# Altium integrated library PCB_Project1.IntLib: 51 symbols (part 1 of 2)
Pins are listed as number, name and electrical type; pins without a type are passive.

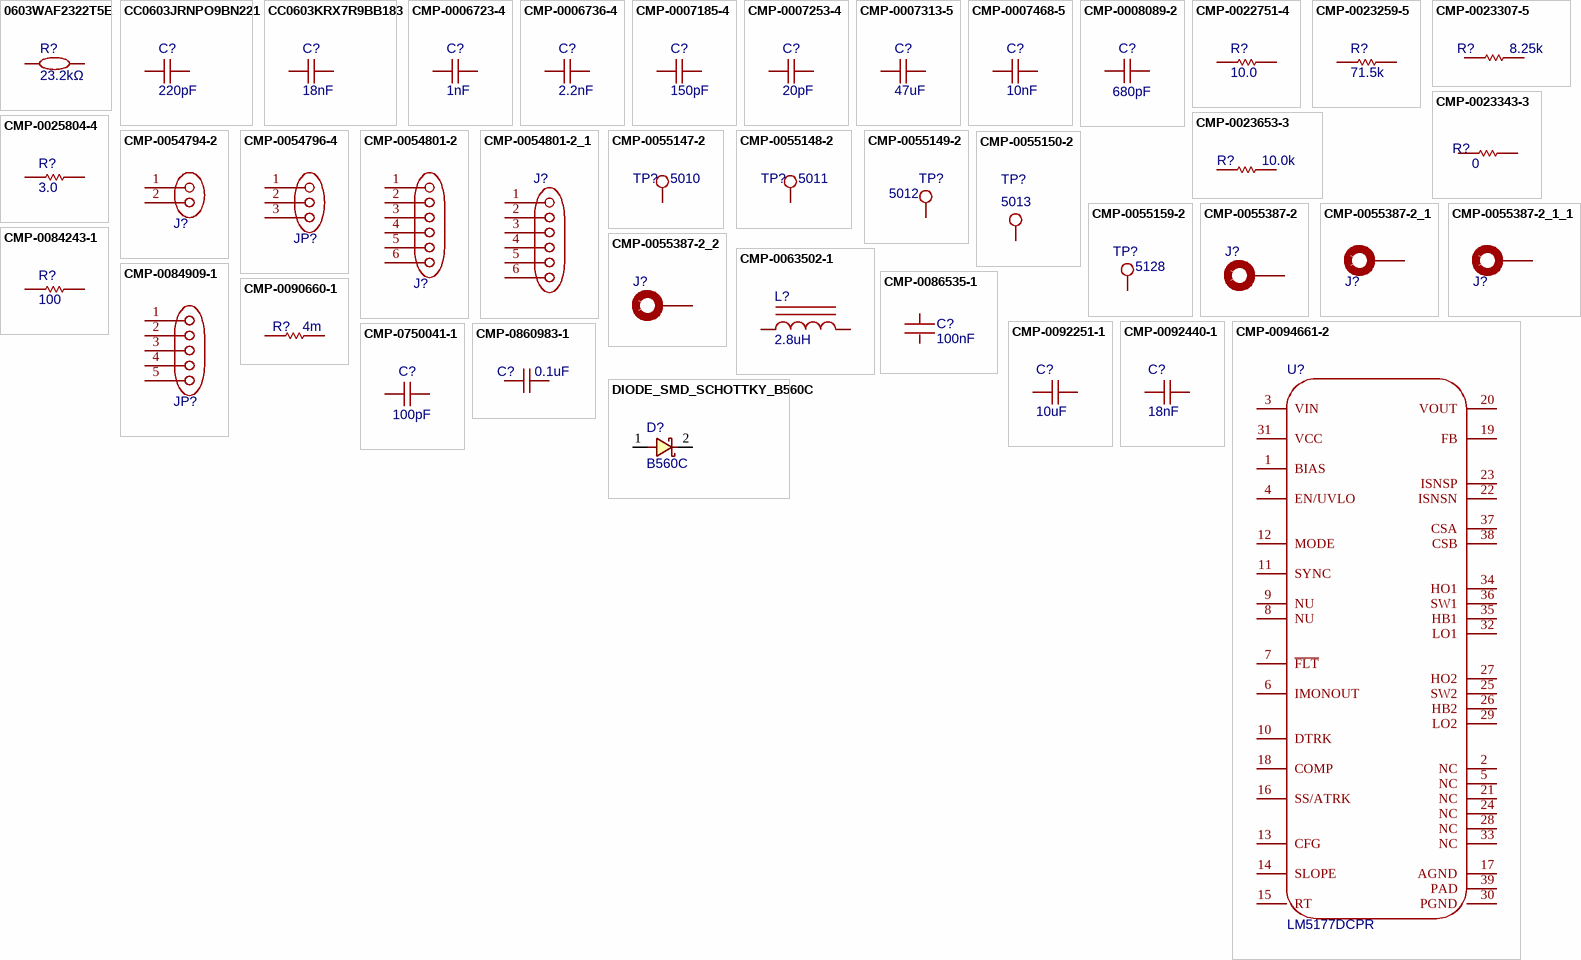
[diagram p0: symbols 0603WAF2322T5E to DIODE_SMD_SCHOTTKY_B560C]

## 0603WAF2322T5E
designator R?, comment 23.2kΩ
电阻类型:厚膜电阻;阻值:23.2kΩ;精度:±1%;功率:100mW;工作电压:75V;温度系数:±100ppm/℃;; Manufacturer: UNI-ROYAL(厚声); Symbol: 0603WAF2322T5E; Add into BOM: yes; 3D Model: fc143cca1e79419f9cd78b61e9279f08; 3D Model Transform: 31.8897,63.7794,0,90,0,0,0,0,0; Tolerance: ±1%; Power(Watts): 100mW; Voltage-Supply(Max): 75V; ModelName: R0603; Device: 0603WAF2322T5E; Convert to PCB: yes; LCSC Part Name: 23.2kΩ ±1% 100mW 厚膜电阻; Supplier Part: C23346; Manufacturer Part: 0603WAF2322T5E; Supplier Footprint: 0603; JLCPCB Part Class: Extended Part; Datasheet: https://item.szlcsc.com/datasheet/0603WAF2322T5E/24079.html; Supplier: LCSC; Type: 厚膜电阻; Temperature Coefficient: ±100ppm/℃; Operating Temperature: -55℃~+155℃; FootprintName: R0603; Value: 23.2kΩ
3D model R0603
footprint R0603D (CHIP Resistor 1/10 WATT, 1.6x0.8mm, 0603, SMD (SolderMask Defined))
pins: 1, 2

## CC0603JRNPO9BN221
designator C?, comment 220pF
容值:220pF;精度:±5%;额定电压:50V;温度系数:NP0;; Manufacturer: YAGEO(国巨); Symbol: CC0603JRNPO9BN221; Add into BOM: yes; 3D Model: ac125912035d415993ca9572d50418b1; 3D Model Transform: 62.992,31.496,0,0,0,0,0,0,0; Tolerance: ±5%; Voltage Rating: 50V; Temperature Coefficient: NP0; ModelName: C0603_L1.6-W0.8-H0.8; Device: CC0603JRNPO9BN221; Convert to PCB: yes; Value: 220pF; LCSC Part Name: 220pF ±5% 50V; Supplier Part: C106210; Manufacturer Part: CC0603JRNPO9BN221; Supplier Footprint: 0603; JLCPCB Part Class: Extended Part; Datasheet: https://item.szlcsc.com/datasheet/CC0603JRNPO9BN221/107425.html; Supplier: LCSC; FootprintName: C0603
footprint C0603D (CHIP Capacitor, 1.6X0.8mm, 0603 , SMD (SolderMask Defined))
3D model C0603_L1.6-W0.8-H0.8
pins: 1, 2

## CC0603KRX7R9BB183
designator C?, comment 18nF
容值:18nF;精度:±10%;额定电压:50V;温度系数:X7R;; Manufacturer: YAGEO(国巨); Symbol: CC0603KRX7R9BB183; Add into BOM: yes; 3D Model: ac125912035d415993ca9572d50418b1; 3D Model Transform: 62.992,31.496,0,0,0,0,0,0,0; Tolerance: ±10%; Voltage Rating: 50V; Temperature Coefficient: X7R; ModelName: C0603_L1.6-W0.8-H0.8; Device: CC0603KRX7R9BB183; Convert to PCB: yes; Value: 18nF; LCSC Part Name: 18nF ±10% 50V; Supplier Part: C107079; Manufacturer Part: CC0603KRX7R9BB183; Supplier Footprint: 0603; JLCPCB Part Class: Extended Part; Datasheet: https://item.szlcsc.com/datasheet/CC0603KRX7R9BB183/108295.html; Supplier: LCSC; FootprintName: C0603
footprint C0603D (CHIP Capacitor, 1.6X0.8mm, 0603 , SMD (SolderMask Defined))
3D model C0603_L1.6-W0.8-H0.8
pins: 1, 2

## CMP-0006723-4
designator C?, comment Cap_F: 1nF  (hidden comment: 06031C102JAT2A)
CAP, CERM, 1000 pF, 100 V, +/- 5%, X7R, 0603; Manufacturer: AVX; Device: CMP-0006723-4; TaMin_C: -55癈; ESR_ohm: 2.76d; Polarized: N; SizeAreaWB_mm2: 4.68; Value1: 0.276 ohm; U/M: EA; Value: 1000pF; TaMax_C: 125癈; SizeZ_mm: 1; SizeX_mm: 1.6; SizeY_mm: 0.8; Cap_Case: 0603; Value2: 100V; SizeArea_mm2: 1.28; CompType: Capacitor; AEC Category: Q200; OriginFootprint 2: 0603_HV; OriginFootprint 3: 0603L; OriginFootprint 4: 0603M; UniqueId: 553def7d7947fca6; AddInBom: yes; Symbol: CMP-0006723-4; Supplier Part Number 2: 96M1234; Publisher: Texas Instruments; Supplier 2: Newark; Supplier Part Number 3: 581-06031C102J; TempCo: X7R; Supplier 3: Mouser; Published: 2008-06-19; RoHS: Y; MountType: SMT; Supplier 1: Digi-Key; PackageReference: 0603; Tolerance_%: 5%; LatestRevisionDate: 2017-03-09; PartNumber: 06031C102JAT2A; AEC Qualified: N; VDC_V: 100V; ComponentLink1Description: Datasheet link; AEC Grade: N/A; Supplier Part Number 1: 478-3698-1-ND; Technology: Ceramic; ValueDisplayed: 1000pF; ComponentLink1URL: http://datasheets.avx.com/X7RDielectric.pdf; Origin Footprint: 0603; DesignItemID: CMP-0006723-4; LibraryName: Altium Vault - TI; FootprintName: 0603S
footprint C0603D (CHIP Capacitor, 1.6X0.8mm, 0603 , SMD (SolderMask Defined))
pins: 1, 2

## CMP-0006736-4
designator C?, comment Cap_F: 2.2nF  (hidden comment: 06031C222JAT2A)
CAP, CERM, 2200 pF, 100 V, +/- 5%, X7R, 0603; Manufacturer: AVX; Device: CMP-0006736-4; TaMin_C: -55癈; ESR_ohm: 0.192; Polarized: N; SizeAreaWB_mm2: 4.68; Value1: 0.192 ohm; U/M: EA; Value: 2200pF; TaMax_C: 125癈; SizeZ_mm: 1; SizeX_mm: 1.6; SizeY_mm: 0.8; Cap_Case: 0603; Value2: 100V; SizeArea_mm2: 1.28; CompType: Capacitor; AEC Category: Q200; OriginFootprint 2: 0603_HV; OriginFootprint 3: 0603L; OriginFootprint 4: 0603M; UniqueId: deb55bbe20a101cf; AddInBom: yes; Symbol: CMP-0006736-4; Supplier Part Number 2: 96M1245; Publisher: Texas Instruments; Supplier 2: Newark; Supplier Part Number 3: 581-06031C222J; TempCo: X7R; Supplier 3: Mouser; Published: 2008-06-19; RoHS: Y; MountType: SMT; Supplier 1: Digi-Key; PackageReference: 0603; Tolerance_%: 5%; LatestRevisionDate: 2017-03-09; PartNumber: 06031C222JAT2A; AEC Qualified: N; VDC_V: 100V; ComponentLink1Description: Datasheet link; AEC Grade: N/A; Supplier Part Number 1: 478-3705-1-ND; Technology: Ceramic; ValueDisplayed: 2200pF; ComponentLink1URL: http://datasheets.avx.com/X7RDielectric.pdf; Origin Footprint: 0603; DesignItemID: CMP-0006736-4; LibraryName: Altium Vault - TI; FootprintName: 0603S
footprint C0603D (CHIP Capacitor, 1.6X0.8mm, 0603 , SMD (SolderMask Defined))
pins: 1, 2

## CMP-0007185-4
designator C?, comment ValueDisplayed: 150pF  (hidden comment: GRM1885C1H151JA01D)
CAP, CERM, 150 pF, 50 V, +/- 5%, C0G/NP0, 0603; Manufacturer: MuRata; Device: CMP-0007185-4; TaMin_C: -55癈; Polarized: N; SizeAreaWB_mm2: 4.68; Value1: Unknown; U/M: EA; Value: 150pF; TaMax_C: 125癈; SizeZ_mm: 1; SizeX_mm: 1.6; SizeY_mm: 0.8; Cap_Case: 0603; Value2: 50V; SizeArea_mm2: 1.28; CompType: Capacitor; AEC Category: Q200; OriginFootprint 2: 0603_HV; OriginFootprint 3: 0603L; OriginFootprint 4: 0603M; UniqueId: ff078052695da6b6; AddInBom: yes; Symbol: CMP-0007185-4; Supplier Part Number 2: 81-GRM39C151J50; Publisher: Texas Instruments; Supplier 2: Mouser; Supplier Part Number 3: 8819874; TempCo: C0G/NP0; Supplier 3: Farnell; Published: 2008-06-19; RoHS: Y; MountType: SMT; Supplier 1: Digi-Key; PackageReference: 0603; Tolerance_%: 5%; LatestRevisionDate: 2017-03-09; PartNumber: GRM1885C1H151JA01D; AEC Qualified: ?; Cap_F: 150pF; VDC_V: 50V; ComponentLink1Description: Datasheet link; Supplier Part Number 1: 490-1431-1-ND; Technology: Ceramic; ComponentLink1URL: http://search.murata.co.jp/Ceramy/PnsearchViewAction.do?HnOFG=ON&HnNFG=ON&SEL_CNT=50&sLang=en&sKey=GRM1885C1H151JA01D&x=9&y=9&search=startwith; Origin Footprint: 0603; DesignItemID: CMP-0007185-4; LibraryName: Altium Vault - TI; FootprintName: 0603S
footprint C0603D (CHIP Capacitor, 1.6X0.8mm, 0603 , SMD (SolderMask Defined))
pins: 1, 2

## CMP-0007253-4
designator C?, comment ValueDisplayed: 20pF  (hidden comment: GRM1885C2A200JA01D)
CAP, CERM, 20 pF, 100 V, +/- 5%, C0G/NP0, 0603; Manufacturer: MuRata; Device: CMP-0007253-4; TaMin_C: -55癈; Polarized: N; SizeAreaWB_mm2: 4.68; Value1: Unknown; U/M: EA; Value: 20pF; TaMax_C: 125癈; SizeZ_mm: 1; SizeX_mm: 1.6; SizeY_mm: 0.8; Cap_Case: 0603; Value2: 100V; SizeArea_mm2: 1.28; CompType: Capacitor; AEC Category: Q200; OriginFootprint 2: 0603_HV; OriginFootprint 3: 0603L; OriginFootprint 4: 0603M; UniqueId: c8e923f96b539988; AddInBom: yes; Symbol: CMP-0007253-4; Supplier Part Number 2: 81-GRM1885C2A200JA1D; Publisher: Texas Instruments; Supplier 2: Mouser; TempCo: C0G/NP0; Published: 2008-06-19; RoHS: Y; MountType: SMT; Supplier 1: Digi-Key; PackageReference: 0603; Tolerance_%: 5%; LatestRevisionDate: 2017-03-09; PartNumber: GRM1885C2A200JA01D; AEC Qualified: ?; Cap_F: 20pF; VDC_V: 100V; ComponentLink1Description: Datasheet link; Supplier Part Number 1: 490-1334-1-ND; Technology: Ceramic; ComponentLink1URL: http://search.murata.co.jp/Ceramy/PnsearchViewAction.do?HnOFG=ON&HnNFG=ON&SEL_CNT=50&sLang=en&sKey=GRM1885C2A200JA01D&x=9&y=9&search=startwith; Origin Footprint: 0603; DesignItemID: CMP-0007253-4; LibraryName: Altium Vault - TI; FootprintName: 0603S
footprint C0603S (CHIP Capacitor, 1.6X0.8mm, 0603, soldered)
pins: 1, 2

## CMP-0007313-5
designator C?, comment ValueDisplayed: 47uF  (hidden comment: GRM188R60J476ME15D)
CAP, CERM, 47 uF, 6.3 V, +/- 20%, X5R, 0603; Manufacturer: MuRata; Device: CMP-0007313-5; TaMin_C: -55癈; Polarized: N; SizeAreaWB_mm2: 4.68; Value1: Unknown; U/M: EA; Value: 47uF; TaMax_C: 85癈; SizeZ_mm: 1; SizeX_mm: 1.6; SizeY_mm: 0.8; Cap_Case: 0603; Value2: 6.3V; SizeArea_mm2: 1.28; CompType: Capacitor; Cap_F: 47礔; AEC Category: Q200; OriginFootprint 2: 0603_HV; OriginFootprint 3: 0603L; OriginFootprint 4: 0603M; UniqueId: 48700c84863a802e; AddInBom: yes; Symbol: CMP-0007313-5; Publisher: Texas Instruments; TempCo: X5R; Published: 2008-06-19; RoHS: Y; MountType: SMT; PackageReference: 0603; Tolerance_%: 20%; LatestRevisionDate: 2017-03-09; PartNumber: GRM188R60J476ME15D; AEC Qualified: ?; VDC_V: 6.3V; ComponentLink1Description: Datasheet link; Technology: Ceramic; ComponentLink1URL: http://psearch.en.murata.com/capacitor/product/GRM188R60J476ME15%23.pdf; Origin Footprint: 0603; DesignItemID: CMP-0007313-5; LibraryName: Altium Vault - TI; FootprintName: 0603S
footprint C0603S (CHIP Capacitor, 1.6X0.8mm, 0603, soldered)
pins: 1, 2

## CMP-0007468-5
designator C?, comment Cap_F: 10nF  (hidden comment: GRM188R72A103KA01D)
CAP, CERM, 0.01 uF, 100 V, +/- 10%, X7R, 0603; Manufacturer: MuRata; Device: CMP-0007468-5; TaMin_C: -55癈; Polarized: N; SizeAreaWB_mm2: 4.68; Value1: Unknown; U/M: EA; Value: 0.01uF; TaMax_C: 125癈; SizeZ_mm: 1; SizeX_mm: 1.6; SizeY_mm: 0.8; Cap_Case: 0603; Value2: 100V; SizeArea_mm2: 1.28; CompType: Capacitor; AEC Category: Q200; OriginFootprint 2: 0603_HV; OriginFootprint 3: 0603L; OriginFootprint 4: 0603M; UniqueId: 6827ca7a6bd67e26; AddInBom: yes; Symbol: CMP-0007468-5; Supplier Part Number 2: 81-GRM188R72A103KA1D; Publisher: Texas Instruments; Supplier 2: Mouser; TempCo: X7R; Published: 2008-06-19; RoHS: Y; MountType: SMT; Supplier 1: Digi-Key; PackageReference: 0603; Tolerance_%: 10%; LatestRevisionDate: 2017-03-09; PartNumber: GRM188R72A103KA01D; AEC Qualified: ?; VDC_V: 100V; ComponentLink1Description: Datasheet link; Supplier Part Number 1: GRM188R72A103KA01D-ND; Technology: Ceramic; ValueDisplayed: 0.01uF; ComponentLink1URL: http://search.murata.co.jp/Ceramy/PnsearchViewAction.do?HnOFG=ON&HnNFG=ON&SEL_CNT=50&sLang=en&sKey=GRM188R72A103KA01D&x=9&y=9&search=startwith; Origin Footprint: 0603; DesignItemID: CMP-0007468-5; LibraryName: Altium Vault - TI; FootprintName: 0603S
footprint C0603D (CHIP Capacitor, 1.6X0.8mm, 0603 , SMD (SolderMask Defined))
pins: 1, 2

## CMP-0008089-2
designator C?, comment ValueDisplayed: 680pF  (hidden comment: GRM2165C1H681JA01D)
CAP, CERM, 680 pF, 50 V, +/- 5%, C0G/NP0, 0805; Manufacturer: MuRata; Device: CMP-0008089-2; TaMin_C: -55癈; Polarized: N; SizeAreaWB_mm2: 6.75; Value1: Unknown; U/M: EA; Value: 680pF; TaMax_C: 125癈; SizeZ_mm: 1.45; SizeX_mm: 2; SizeY_mm: 1.25; Cap_Case: 0805; Value2: 50V; SizeArea_mm2: 2.5; CompType: Capacitor; AEC Category: Q200; Origin Footprint: 0805_HV; OriginFootprint 2: 0805M; OriginFootprint 4: 0805L; UniqueId: 7f35450ac3171d20; AddInBom: yes; Symbol: CMP-0008089-2; Supplier Part Number 2: 81-GRM40C681J50D; Publisher: Texas Instruments; Supplier 2: Mouser; TempCo: C0G/NP0; Published: 2008-06-19; RoHS: Y; MountType: SMT; Supplier 1: Digi-Key; PackageReference: 0805; Tolerance_%: 5%; LatestRevisionDate: 2017-03-09; PartNumber: GRM2165C1H681JA01D; AEC Qualified: ?; Cap_F: 680pF; VDC_V: 50V; ComponentLink1Description: Datasheet link; Supplier Part Number 1: 490-1619-1-ND; Technology: Ceramic; ComponentLink1URL: http://search.murata.co.jp/Ceramy/PnsearchViewAction.do?HnOFG=ON&HnNFG=ON&SEL_CNT=50&sLang=en&sKey=GRM2165C1H681JA01D&x=9&y=9&search=startwith; OriginFootprint 3: 0805; DesignItemID: CMP-0008089-2; LibraryName: Altium Vault - TI; FootprintName: 0805_HV1
footprint C0805D (CHIP Capacitor, 2.0X1.3mm, 0805, SMD (SolderMask Defined))
pins: 1, 2

## CMP-0022751-4
designator R?, comment ValueDisplayed: 10.0  (hidden comment: RC0603FR-0710RL)
RES, 10.0, 1%, 0.1 W, 0603; Manufacturer: Yageo; Device: CMP-0022751-4; Power_W: 100mW; TempCo: 100 ppm/C; Value_Code: 10R0; Value: 10.0; EIA_Code: E96; Res_ohm: 10; SizeX_mm: 1.6; SizeY_mm: 0.8; SizeZ_mm: 1; Value2: 0.1W; SizeArea_mm2: 1.28; CompType: Resistor; AEC Qualified: N; VDC_V: 75V; AEC Category: Q200; SizeAreaWB_mm2: 4.68; Origin Footprint: 0603; OriginFootprint 2: 0603_HV; OriginFootprint 3: 0603L; OriginFootprint 4: 0603M; UniqueId: fe3640da4f52432f; AddInBom: yes; Symbol: CMP-0022751-4; ComponentLink1URL: http://www.yageo.com/pdf/Pu-RC0603_51_PbFree_L_2.pdf; Supplier Part Number 2: 603-RC0603FR-0710RL; Supplier 2: Mouser; Supplier Part Number 3: 9238247; Supplier 3: Farnell; RoHS: Y; Value1: 1%; MountType: SMT; Supplier 1: Digi-Key; PackageReference: 0603; Tolerance_%: 1%; PartNumber: RC0603FR-0710RL; ComponentLink1Description: Datasheet link; Supplier Part Number 1: 311-10.0HRCT-ND; Technology: Thick Film; AEC Grade: N/A; DesignItemID: CMP-0022751-4; LibraryName: Altium Vault - TI; FootprintName: 0603S
footprint R0603D (CHIP Resistor 1/10 WATT, 1.6x0.8mm, 0603, SMD (SolderMask Defined))
pins: 1, 2

## CMP-0023259-5
designator R?, comment ValueDisplayed: 71.5k  (hidden comment: RC0603FR-0771K5L)
RES, 71.5 k, 1%, 0.1 W, 0603; Manufacturer: Yageo; Device: CMP-0023259-5; Power_W: 100mW; TempCo: 100 ppm/C; Value_Code: 71k5; Value: 71.5k; EIA_Code: E96; SizeX_mm: 1.6; SizeY_mm: 0.8; SizeZ_mm: 1; Value2: 0.1W; SizeArea_mm2: 1.28; CompType: Resistor; AEC Qualified: N; VDC_V: 75V; AEC Category: Q200; SizeAreaWB_mm2: 4.68; Origin Footprint: 0603; OriginFootprint 2: 0603_HV; OriginFootprint 3: 0603L; OriginFootprint 4: 0603M; UniqueId: 353b166cc2dee846; AddInBom: yes; Symbol: CMP-0023259-5; Supplier Part Number 2: 603-RC0603FR-0771K5L; Supplier 2: Mouser; RoHS: Y; Value1: 1%; MountType: SMT; Supplier 1: Digi-Key; PackageReference: 0603; Tolerance_%: 1%; Res_ohm: 71.5k; PartNumber: RC0603FR-0771K5L; ComponentLink1Description: Datasheet link; Supplier Part Number 1: 311-71.5KHRCT-ND; Technology: Thick Film; ComponentLink1URL: http://www.yageo.com/pdf/Pu-RC0603_51_PbFree_L_2.pdf; AEC Grade: N/A; DesignItemID: CMP-0023259-5; LibraryName: Altium Vault - TI; FootprintName: 0603S
footprint R0603D (CHIP Resistor 1/10 WATT, 1.6x0.8mm, 0603, SMD (SolderMask Defined))
pins: 1, 2

## CMP-0023307-5
designator R?, comment ValueDisplayed: 8.25k  (hidden comment: RC0603FR-078K25L)
RES, 8.25 k, 1%, 0.1 W, 0603; Manufacturer: Yageo; Symbol: CMP-0023307-5; Power_W: 100mW; TempCo: 100 ppm/C; Value_Code: 8k25; Value: 8.25k; EIA_Code: E96; SizeX_mm: 1.6; SizeY_mm: 0.8; SizeZ_mm: 1; Value2: 0.1W; SizeArea_mm2: 1.28; CompType: Resistor; AEC Qualified: N; VDC_V: 75V; AEC Category: Q200; SizeAreaWB_mm2: 4.68; Origin Footprint: 0603; OriginFootprint 2: 0603_HV; OriginFootprint 3: 0603L; OriginFootprint 4: 0603M; AddInBom: yes; Device: CMP-0023307-5; Supplier Part Number 2: 603-RC0603FR-078K25L; Supplier 2: Mouser; Supplier Part Number 3: 9238590; Supplier 3: Farnell; RoHS: Y; Value1: 1%; MountType: SMT; Supplier 1: Digi-Key; PackageReference: 0603; Tolerance_%: 1%; Res_ohm: 8.25k; PartNumber: RC0603FR-078K25L; ComponentLink1Description: Datasheet link; Supplier Part Number 1: 311-8.25KHRCT-ND; Technology: Thick Film; ComponentLink1URL: http://www.yageo.com/pdf/Pu-RC0603_51_PbFree_L_2.pdf; AEC Grade: N/A; DesignItemID: CMP-0023307-5; LibraryName: Altium Vault - TI; FootprintName: 0603S
footprint R0603D (CHIP Resistor 1/10 WATT, 1.6x0.8mm, 0603, SMD (SolderMask Defined))
pins: 1, 2

## CMP-0023343-3
designator R?, comment ValueDisplayed: 0  (hidden comment: RMCF0603ZT0R00)
RES, 0, 1%, 0.1 W, AEC-Q200 Grade 0, 0603; Manufacturer: Stackpole Electronics Inc; Device: CMP-0023343-3; Power_W: 100mW; TempCo: ppm/C; U/M: EA; Value: 0; SizeX_mm: 1.6; SizeY_mm: 0.8; SizeZ_mm: 1; Value2: 0.1W; SizeArea_mm2: 1.28; CompType: Resistor; AEC Qualified: Y; AEC Category: Q200; Origin Footprint: 0603; OriginFootprint 2: 0603_HV; OriginFootprint 3: 0603L; OriginFootprint 4: 0603M; AddInBom: yes; Symbol: CMP-0023343-3; Publisher: Texas Instruments; Published: 2008-06-26; Value_Code: 0; RoHS: Y; Value1: 1%; MountType: SMT; Supplier 1: Digi-Key; PackageReference: 0603; Tolerance_%: 1%; Res_ohm: 0; LatestRevisionDate: 2017-03-09; PartNumber: RMCF0603ZT0R00; ComponentLink1Description: Datasheet link; AEC Grade: 0; Supplier Part Number 1: RMCF0603ZT0R00CT-ND; Technology: Thick Film; ComponentLink1URL: https://www.seielect.com/Catalog/SEI-RMCF_RMCP.pdf; DesignItemID: CMP-0023343-3; LibraryName: Altium Vault - TI; FootprintName: 0603S
footprint R0603D (CHIP Resistor 1/10 WATT, 1.6x0.8mm, 0603, SMD (SolderMask Defined))
pins: 1, 2

## CMP-0023653-3
designator R?, comment ValueDisplayed: 10.0k  (hidden comment: RT0603BRD0710KL)
RES, 10.0 k, 0.1%, 0.1 W, 0603; Manufacturer: Yageo America; Device: CMP-0023653-3; Power_W: 100mW; TempCo: 25 ppm/C; Value_Code: 10k0; U/M: EA; Value: 10.0k; EIA_Code: E192; Res_ohm: 10k; SizeX_mm: 1.6; SizeY_mm: 0.8; SizeZ_mm: 1; Value2: 0.1W; SizeArea_mm2: 1.28; CompType: Resistor; VDC_V: 75V; AEC Category: Q200; Origin Footprint: 0603; OriginFootprint 2: 0603_HV; OriginFootprint 3: 0603L; OriginFootprint 4: 0603M; UniqueId: 3c543c7c58e1cc80; AddInBom: yes; Symbol: CMP-0023653-3; Publisher: Texas Instruments; Published: 2008-06-26; RoHS: Y; Value1: 0.1%; MountType: SMT; PackageReference: 0603; Tolerance_%: 0.1%; LatestRevisionDate: 2017-03-09; PartNumber: RT0603BRD0710KL; AEC Qualified: ?; ComponentLink1Description: Datasheet link; Technology: Thin Film; ComponentLink1URL: http://www.yageo.com/pdf/PYu-RT_1-to-0.05_RoHS_L_3.pdf; DesignItemID: CMP-0023653-3; LibraryName: Altium Vault - TI; FootprintName: 0603S
footprint R0603D (CHIP Resistor 1/10 WATT, 1.6x0.8mm, 0603, SMD (SolderMask Defined))
pins: 1, 2

## CMP-0025804-4
designator R?, comment ValueDisplayed: 3.0  (hidden comment: CRCW06033R00JNEA)
RES, 3.0, 5%, 0.1 W, AEC-Q200 Grade 0, 0603; Manufacturer: Vishay-Dale; Device: CMP-0025804-4; Power_W: 100mW; TempCo: 200 ppm/C; Value_Code: 3R00; Value: 3.0; EIA_Code: E24; Res_ohm: 3; SizeX_mm: 1.6; SizeY_mm: 0.8; SizeZ_mm: 1; Value2: 0.1W; SizeArea_mm2: 1.28; CompType: Resistor; AEC Qualified: Y; VDC_V: 75V; AEC Category: Q200; AEC Grade: 0; Origin Footprint: 0603; OriginFootprint 2: 0603_HV; OriginFootprint 3: 0603L; OriginFootprint 4: 0603M; UniqueId: ba2c6d155e7fd301; AddInBom: yes; Symbol: CMP-0025804-4; Supplier Part Number 2: 47P3561; Supplier 2: Newark; Supplier Part Number 3: 71-CRCW0603J-3-E3; Supplier 3: Mouser; RoHS: E; Value1: 5%; MountType: SMT; Supplier 1: Digi-Key; PackageReference: 0603; Tolerance_%: 5%; PartNumber: CRCW06033R00JNEA; ComponentLink1Description: Datasheet link; Supplier Part Number 1: 541-3.0GCT-ND; Technology: Thick Film; ComponentLink1URL: http://www.vishay.com/docs/20035/dcrcwe3.pdf; DesignItemID: CMP-0025804-4; LibraryName: Altium Vault - TI; FootprintName: 0603S
footprint R0603D (CHIP Resistor 1/10 WATT, 1.6x0.8mm, 0603, SMD (SolderMask Defined))
pins: 1, 2

## CMP-0054794-2
designator J?, comment 61300211121  (value not drawn)
Header, 2.54 mm, 2x1, Gold, TH; Manufacturer: Wurth Elektronik; Device: CMP-0054794-2; Shrouded: N; Gender: Male; Green_REACh: Passed; Pitch_mm: 2.54; Green_Lifecycle: Active; Row_Count: 1; Cert_UL: Y; UniqueId: 19810ed2731c20b4; AddInBom: yes; Symbol: CMP-0054794-2; Supplier Part Number 2: 20X0948; Orientation: Vertical; PinCount: 2; ClassName: Header; Supplier 2: Newark; PackageReference: Header, 2.54mm, 2x1, TH; CompType: Header; ComponentLink1Description: Datasheet URL; Supplier 1: Digi-Key; Green_EU RoHS-2: Incomplete; ComponentLink1URL: http://katalog.we-online.de/em/datasheet/6130xx11121.pdf; Green_EU RoHS: Passed; MountType: TH; Supplier Part Number 3: 710-61300211121; RoHS: Y; Supplier Part Number 1: 732-5315-ND; ContactFinish: Gold; Supplier 3: Mouser; PartNumber: 61300211121; Color: Black; DesignItemID: CMP-0054794-2; LibraryName: Altium Vault - TI; FootprintName: WURTH_61300211121; OriginModelName: 61300211121
footprint HDR_F_1X2 (HEADER FEMALE pitch: 2.54mm)
pins: 1, 2

## CMP-0054796-4
designator JP?, comment 61300311121  (value not drawn)
Header, 2.54 mm, 3x1, Gold, TH; Manufacturer: Wurth Elektronik; Device: CMP-0054796-4; Green_Lifecycle: Active; Green_REACh: Passed; CT: FALSE; CNHeader: TRUE; UniqueId: 4fe8deccf3ecd12b; AddInBom: yes; Symbol: CMP-0054796-4; MountType: TH; Supplier Part Number 1: 732-5316-ND; ClassName: Header; Supplier Part Number 3: 356154; ComponentLink1Description: Datasheet URL; ComponentLink1URL: http://katalog.we-online.de/em/datasheet/6130xx11121.pdf; PackageReference: Header, 2.54mm, 3x1, TH; Supplier Part Number 2: 20X0950; Green_EU RoHS-2: Incomplete; CompType: Header; Green_EU RoHS: Passed; RoHS: Y; PartNumber: 61300311121; Supplier 2: Newark; Supplier 1: Digi-Key; Supplier 3: Farnell; Publisher: Texas Instruments; LatestRevisionDate: 26/05/2017; DesignItemID: CMP-0054796-4; LibraryName: Altium Vault - TI; FootprintName: WURTH_61300311121; OriginModelName: 61300311121
footprint HDR_F_1X3 (HEADER FEMALE pitch: 2.54mm)
pins: 1, 2, 3

## CMP-0054801-2
designator J?, comment 61300611121  (value not drawn)
Header, 2.54 mm, 6x1, Gold, TH; Manufacturer: Wurth Elektronik; Device: CMP-0054801-2; Cert_UL: Y; Gender: Male; Row_Count: 1; Shrouded: N; Pitch_mm: 2.54; UniqueId: 188f82074eb8ca32; AddInBom: yes; Symbol: CMP-0054801-2; RoHS: Y; CompType: Header; Supplier Part Number 2: 20X0957; Supplier 1: Digi-Key; PinCount: 6; Color: Black; PartNumber: 61300611121; Supplier 3: Mouser; ComponentLink1URL: http://katalog.we-online.de/em/datasheet/6130xx11121.pdf; ContactFinish: Gold; MountType: TH; Supplier Part Number 3: 710-61300611121; PackageReference: Header, 2.54mm, 6x1, TH; Supplier Part Number 1: 732-5319-ND; ClassName: Header; Supplier 2: Newark; Orientation: Vertical; ComponentLink1Description: Datasheet URL; DesignItemID: CMP-0054801-2; LibraryName: Altium Vault - TI; FootprintName: WURTH_61300611121; OriginModelName: 61300611121
footprint HDR_F_1X6 (HEADER FEMALE pitch: 2.54mm)
pins: 1, 2, 3, 4, 5, 6

## CMP-0054801-2_1
designator J?, comment 61300611121  (value not drawn)
Header, 2.54 mm, 6x1, Gold, TH; Manufacturer: Wurth Elektronik; Device: CMP-0054801-2_1; Symbol: CMP-0054801-2; Cert_UL: Y; Gender: Male; Row_Count: 1; Shrouded: N; Pitch_mm: 2.54; UniqueId: be1703a8306ee88a; AddInBom: yes; RoHS: Y; CompType: Header; Supplier Part Number 2: 20X0957; Supplier 1: Digi-Key; PinCount: 6; Color: Black; PartNumber: 61300611121; Supplier 3: Mouser; ComponentLink1URL: http://katalog.we-online.de/em/datasheet/6130xx11121.pdf; ContactFinish: Gold; MountType: TH; Supplier Part Number 3: 710-61300611121; PackageReference: Header, 2.54mm, 6x1, TH; Supplier Part Number 1: 732-5319-ND; ClassName: Header; Supplier 2: Newark; Orientation: Vertical; ComponentLink1Description: Datasheet URL; DesignItemID: CMP-0054801-2; LibraryName: Altium Vault - TI; FootprintName: WURTH_61300611121; OriginModelName: 61300611121
footprint HDR_F_1X6 (HEADER FEMALE pitch: 2.54mm)
pins: 1, 2, 3, 4, 5, 6

## CMP-0055147-2
designator TP?, comment 5010
Test Point, Multipurpose, Red, TH; Manufacturer: Keystone Electronics; Device: CMP-0055147-2; CNHeader: FALSE; Green_Lifecycle: Active; Green_REACh: Passed; ContactFinish: Silver; CT: TRUE; UniqueId: 4726d92b84fba278; AddInBom: yes; OriginModelName: Keystone_5010; Symbol: CMP-0055147-2; ComponentLink1URL: http://www.keyelco.com/userAssets/file/M60-2p60.pdf; Supplier Part Number 2: 534-5010; Publisher: Texas Instruments; Supplier 2: Mouser; Color: Red; RoHS: Y; MountType: TH; Green_EU RoHS-2: Incomplete; Supplier 1: Digi-Key; Green_EU RoHS: Passed; PackageReference: Red Multipurpose Testpoint; CompType: Test Point; LatestRevisionDate: 26/05/2017; PartNumber: 5010; ComponentLink1Description: Datasheet URL; Supplier Part Number 1: 36-5010-ND; DesignItemID: CMP-0055147-2; LibraryName: Altium Vault - TI; FootprintName: Keystone5010
footprint TPTHD_C_BLK1 (Thru-hole test point loop, 1.6mm Hole)
pins: 1

## CMP-0055148-2
designator TP?, comment 5011
Test Point, Multipurpose, Black, TH; Manufacturer: Keystone Electronics; Device: CMP-0055148-2; CNHeader: FALSE; Green_Lifecycle: Active; Green_REACh: Passed; ContactFinish: Silver; CT: TRUE; UniqueId: 8df4c48c9acaaf69; AddInBom: yes; OriginModelName: Keystone_5011; Symbol: CMP-0055148-2; ComponentLink1URL: http://www.keyelco.com/userAssets/file/M60-2p60.pdf; Supplier Part Number 2: 534-5011; Publisher: Texas Instruments; Supplier 2: Mouser; Color: Black; RoHS: Y; MountType: TH; Green_EU RoHS-2: Incomplete; Supplier 1: Digi-Key; Green_EU RoHS: Passed; PackageReference: Black Multipurpose Testpoint; CompType: Test Point; LatestRevisionDate: 26/05/2017; PartNumber: 5011; ComponentLink1Description: Datasheet URL; Supplier Part Number 1: 36-5011-ND; DesignItemID: CMP-0055148-2; LibraryName: Altium Vault - TI; FootprintName: Keystone5011
footprint TPTHD_C_BLK1 (Thru-hole test point loop, 1.6mm Hole)
pins: 1

## CMP-0055149-2
designator TP?, comment 5012
Test Point, Multipurpose, White, TH; Manufacturer: Keystone Electronics; Device: CMP-0055149-2; CNHeader: FALSE; Green_Lifecycle: Active; Green_REACh: Passed; ContactFinish: Silver; CT: TRUE; UniqueId: 84aa4de12bc2747c; AddInBom: yes; OriginModelName: Keystone_5012; Symbol: CMP-0055149-2; ComponentLink1URL: http://www.keyelco.com/userAssets/file/M60-2p60.pdf; Supplier Part Number 2: 534-5012; Publisher: Texas Instruments; Supplier 2: Mouser; Color: White; RoHS: Y; MountType: TH; Green_EU RoHS-2: Incomplete; Supplier 1: Digi-Key; Green_EU RoHS: Passed; PackageReference: White Multipurpose Testpoint; CompType: Test Point; LatestRevisionDate: 26/05/2017; PartNumber: 5012; ComponentLink1Description: Datasheet URL; Supplier Part Number 1: 36-5012-ND; DesignItemID: CMP-0055149-2; LibraryName: Altium Vault - TI; FootprintName: Keystone5012
footprint TPTHD_C_BLK1 (Thru-hole test point loop, 1.6mm Hole)
pins: 1

## CMP-0055150-2
designator TP?, comment 5013
Test Point, Multipurpose, Orange, TH; Manufacturer: Keystone Electronics; Device: CMP-0055150-2; CNHeader: FALSE; Green_Lifecycle: Active; Green_REACh: Passed; ContactFinish: Silver; CT: TRUE; UniqueId: 21ffbae72f4f4154; AddInBom: yes; OriginModelName: Keystone_5013; Symbol: CMP-0055150-2; ComponentLink1URL: http://www.keyelco.com/userAssets/file/M60-2p60.pdf; Supplier Part Number 2: 534-5013; Publisher: Texas Instruments; Supplier 2: Mouser; Color: Orange; RoHS: Y; MountType: TH; Green_EU RoHS-2: Incomplete; Supplier 1: Digi-Key; Green_EU RoHS: Passed; PackageReference: Orange Multipurpose Testpoint; CompType: Test Point; LatestRevisionDate: 26/05/2017; PartNumber: 5013; ComponentLink1Description: Datasheet URL; Supplier Part Number 1: 36-5013-ND; DesignItemID: CMP-0055150-2; LibraryName: Altium Vault - TI; FootprintName: Keystone5013
footprint TPTHD_C_BLK1 (Thru-hole test point loop, 1.6mm Hole)
pins: 1

## CMP-0055159-2
designator TP?, comment 5128
Test Point, Multipurpose, Grey, TH; Manufacturer: Keystone Electronics; Device: CMP-0055159-2; CNHeader: FALSE; Green_Lifecycle: Active; Green_REACh: Passed; ContactFinish: Silver; CT: TRUE; UniqueId: 7a581efd1dfccb02; AddInBom: yes; OriginModelName: Keystone_5128; Symbol: CMP-0055159-2; ComponentLink1URL: http://www.keyelco.com/userAssets/file/M60-2p60.pdf; Supplier Part Number 2: 95M2500; Publisher: Texas Instruments; Supplier 2: Newark; Supplier Part Number 3: 534-5128; Color: Grey; Supplier 3: Mouser; RoHS: Y; MountType: TH; Green_EU RoHS-2: Incomplete; Supplier 1: Digi-Key; Green_EU RoHS: Passed; PackageReference: Grey Multipurpose Testpoint; CompType: Test Point; LatestRevisionDate: 26/05/2017; PartNumber: 5128; ComponentLink1Description: Datasheet URL; Supplier Part Number 1: 36-5128-ND; DesignItemID: CMP-0055159-2; LibraryName: Altium Vault - TI; FootprintName: Keystone5128
footprint TPTHD_C_BLK1 (Thru-hole test point loop, 1.6mm Hole)
pins: 1

## CMP-0055387-2
designator J?, comment 108-0740-001  (value not drawn)
Standard Banana Jack, Uninsulated, 15A; Manufacturer: Cinch Connectivity; Device: CMP-0055387-2; CNHeader: FALSE; Green_Lifecycle: Active; Green_REACh: Passed; CT: TRUE; UniqueId: 51bfc0e5166a1c40; AddInBom: yes; OriginModelName: Johnson_108-0740-001; Symbol: CMP-0055387-2; Supplier Part Number 2: 530-108-0740-1; Publisher: Texas Instruments; Supplier 2: Mouser; RoHS: Y; MountType: TH; Green_EU RoHS-2: Passed; Supplier 1: Digi-Key; Green_EU RoHS: Passed with Exemption; PackageReference: Banana Jack; CompType: Banana Jack; LatestRevisionDate: 26/05/2017; PartNumber: 108-0740-001; ComponentLink1Description: Datasheet URL; Supplier Part Number 1: J147-ND; ComponentLink1URL: http://emersonnetworkpower.com/webapp/wcs/stores/servlet/ESC/resources/1080740001.pdf; DesignItemID: CMP-0055387-2; LibraryName: Altium Vault - TI; FootprintName: Johnson_108-0740-001
footprint BNANASKT_L_BLK (Banana socket long black)
pins: 1

## CMP-0055387-2_1
designator J?, comment 108-0740-001  (value not drawn)
Standard Banana Jack, Uninsulated, 15A; Manufacturer: Cinch Connectivity; Device: CMP-0055387-2_1; Symbol: CMP-0055387-2; CNHeader: FALSE; Green_Lifecycle: Active; Green_REACh: Passed; CT: TRUE; UniqueId: 1fb9863844ab5169; AddInBom: yes; OriginModelName: Johnson_108-0740-001; Supplier Part Number 2: 530-108-0740-1; Publisher: Texas Instruments; Supplier 2: Mouser; RoHS: Y; MountType: TH; Green_EU RoHS-2: Passed; Supplier 1: Digi-Key; Green_EU RoHS: Passed with Exemption; PackageReference: Banana Jack; CompType: Banana Jack; LatestRevisionDate: 26/05/2017; PartNumber: 108-0740-001; ComponentLink1Description: Datasheet URL; Supplier Part Number 1: J147-ND; ComponentLink1URL: http://emersonnetworkpower.com/webapp/wcs/stores/servlet/ESC/resources/1080740001.pdf; DesignItemID: CMP-0055387-2; LibraryName: Altium Vault - TI; FootprintName: Johnson_108-0740-001
footprint BNANASKT_L_RED (Banana socket long Red)
pins: 1

## CMP-0055387-2_1_1
designator J?, comment 108-0740-001  (value not drawn)
Standard Banana Jack, Uninsulated, 15A; Manufacturer: Cinch Connectivity; Device: CMP-0055387-2_1; Symbol: CMP-0055387-2; CNHeader: FALSE; Green_Lifecycle: Active; Green_REACh: Passed; CT: TRUE; UniqueId: 7aadee231938cadd; AddInBom: yes; OriginModelName: Johnson_108-0740-001; Supplier Part Number 2: 530-108-0740-1; Publisher: Texas Instruments; Supplier 2: Mouser; RoHS: Y; MountType: TH; Green_EU RoHS-2: Passed; Supplier 1: Digi-Key; Green_EU RoHS: Passed with Exemption; PackageReference: Banana Jack; CompType: Banana Jack; LatestRevisionDate: 26/05/2017; PartNumber: 108-0740-001; ComponentLink1Description: Datasheet URL; Supplier Part Number 1: J147-ND; ComponentLink1URL: http://emersonnetworkpower.com/webapp/wcs/stores/servlet/ESC/resources/1080740001.pdf; DesignItemID: CMP-0055387-2; LibraryName: Altium Vault - TI; FootprintName: Johnson_108-0740-001
footprint BNANASKT_L_BLK (Banana socket long black)
pins: 1

## CMP-0055387-2_2
designator J?, comment 108-0740-001  (value not drawn)
Standard Banana Jack, Uninsulated, 15A; Manufacturer: Cinch Connectivity; Device: CMP-0055387-2; CNHeader: FALSE; Green_Lifecycle: Active; Green_REACh: Passed; CT: TRUE; UniqueId: 51bfc0e5166a1c40; AddInBom: yes; OriginModelName: Johnson_108-0740-001; Symbol: CMP-0055387-2; Supplier Part Number 2: 530-108-0740-1; Publisher: Texas Instruments; Supplier 2: Mouser; RoHS: Y; MountType: TH; Green_EU RoHS-2: Passed; Supplier 1: Digi-Key; Green_EU RoHS: Passed with Exemption; PackageReference: Banana Jack; CompType: Banana Jack; LatestRevisionDate: 26/05/2017; PartNumber: 108-0740-001; ComponentLink1Description: Datasheet URL; Supplier Part Number 1: J147-ND; ComponentLink1URL: http://emersonnetworkpower.com/webapp/wcs/stores/servlet/ESC/resources/1080740001.pdf; DesignItemID: CMP-0055387-2; LibraryName: Altium Vault - TI; FootprintName: Johnson_108-0740-001
footprint BNANASKT_L_RED (Banana socket long Red)
pins: 1

## CMP-0063502-1
designator L?, comment ValueDisplayed: 2.8uH  (hidden comment: APZBX1265M2R8)
Manufacturer: Vishay-Dale; PartNumber: IHLP5050FDER1R8M01; Device: CMP-0063502-1; Isat: 41A @ 20% inductance drop; Irms: 24A @ 40C rise; Green_Lifecycle: Active; SizeAreaWB_mm2: 226.48; DCR_ohm: 3.2m; Green_REACh: Passed; Value1: 0.0032 ohm; Material: Powdered Iron; Value: 2.8uH; Imax_A: 24A; SizeZ_mm: 6.5; SizeX_mm: 13.2; SizeY_mm: 12.9; SizeArea_mm2: 170.28; CompType: Inductor; Ind_H: 1.8礖; AEC Category: Q200; UniqueId: d450ceac7adb81c3; AddInBom: yes; Symbol: CMP-0063502-1; ComponentLink1URL: http://www.vishay.com/docs/34123/lp50fd01.pdf; Publisher: Texas Instruments; Published: 2008-06-26; RoHS: Y; MountType: SMT; Green_EU RoHS-2: Passed; Supplier 1: Digi-Key; Green_EU RoHS: Passed; PackageReference: IHLP-5050FD; Value2: 24A; LatestRevisionDate: 2017-06-02; AEC Qualified: ?; ComponentLink1Description: Datasheet link; Supplier Part Number 1: IHLP5050FDER1R8M01-ND; Technology: Shielded; DesignItemID: CMP-0063502-1; LibraryName: Altium Vault - TI; FootprintName: IHLP-5050FD
footprint L_12 (INDUCTOR, 13.5x12.5mm, DR125, CDRH127, D128C 931AS)
pins: 1, 2

## CMP-0084243-1
designator R?, comment ValueDisplayed: 100  (hidden comment: CRCW0603100RFKEAHP)
RES, 100, 1%, 0.25 W, AEC-Q200 Grade 0, 0603; Manufacturer: Vishay-Dale; Device: CMP-0084243-1; Power_W: 250mW; TempCo: 100 ppm/C; SizeAreaWB_mm2: 4.68; Value_Code: 100R; Value: 100; EIA_Code: E96; SizeX_mm: 1.6; SizeY_mm: 0.8; SizeZ_mm: 1; Value2: 0.25W; SizeArea_mm2: 1.28; CompType: Resistor; AEC Qualified: Y; AEC Grade: 0; AEC Category: Q200; Origin Footprint: 0603; OriginFootprint 2: 0603M; OriginFootprint 3: 0603L; OriginFootprint 4: 0603_HV; UniqueId: 763cf8d5648cb4fd; AddInBom: yes; Symbol: CMP-0084243-1; ComponentLink1URL: http://www.vishay.com/docs/20043/crcwhpe3.pdf; RoHS: Y; Value1: 1%; MountType: SMT; PackageReference: 0603; Tolerance_%: 1%; Res_ohm: 100; PartNumber: CRCW0603100RFKEAHP; ComponentLink1Description: Datasheet link; Technology: Thick Film; DesignItemID: CMP-0084243-1; LibraryName: Altium Vault - TI; FootprintName: 0603S
footprint R0603D (CHIP Resistor 1/10 WATT, 1.6x0.8mm, 0603, SMD (SolderMask Defined))
pins: 1, 2

## CMP-0084909-1
designator JP?, comment 61300511121  (value not drawn)
Header, 2.54mm, 5x1, Gold, TH; Manufacturer: Wurth Elektronik; Device: CMP-0084909-1; Pitch_mm: 2.54; Current_A: 3A; Shrouded: N; Gender: Male; Voltage_V: 250V; Row_Count: 1; UniqueId: 1e4a53fbbd604e66; AddInBom: yes; Symbol: CMP-0084909-1; MountType: TH; PinCount: 5; Color: Black; ClassName: Header; ContactFinish: Gold; ComponentLink1Description: Datasheet URL; ComponentLink1URL: https://katalog.we-online.de/em/datasheet/6130xx11121.pdf; PackageReference: Header, 2.54mm, 5x1, TH; CompType: Header; Orientation: Vertical; RoHS: Y; PartNumber: 61300511121; DesignItemID: CMP-0084909-1; LibraryName: Altium Vault - TI; FootprintName: Wurth_61300511121; OriginModelName: 61300511121
footprint HDR_F_1X5 (HEADER FEMALE pitch: 2.54mm)
pins: 1, 2, 3, 4, 5

## CMP-0086535-1
designator C?, comment Cap_F: 100nF  (hidden comment: GCM188L81H104KA57D)
0.1礔 -10% 50V Ceramic Capacitor X8L 0603 (1608 Metric); Manufacturer: Murata Electronics North America; Device: CMP-0086535-1; Symbol Name: SYM-GCM188L81H104KA57D; Tolerance_%: 10%; AEC Qualified: Yes; TempCo: -40+15%; SizeZ_mm: 0.9mm; AEC Grade: Grade 0; Origin Footprint: FP-GCM188L81H104KA57D_0603-IPC_C; OriginFootprint 2: FP-GCM188L81H104KA57D_0603-IPC_B; OriginFootprint 3: FP-GCM188L81H104KA57D_0603-IPC_A; UniqueId: e3aeb17489c0ab5d; OriginModelName: Cap_GCM188L81H104KA57D_0603; Symbol: CMP-0086535-1; RoHS: TRUE; PackageReference: 0603; ComponentLink1URL: https://search.murata.co.jp/Ceramy/image/img/A01X/G101/ENG/GCM188L81H104KA57-01.pdf; PartNumber: GCM188L81H104KA57D; ComponentLink1Description: Datasheet; VDC_V: 50V; DesignItemID: CMP-0086535-1; LibraryName: Altium Vault - TI; FootprintName: FP-GCM188L81H104KA57D_0603-MFG; AddInBom: yes
footprint C0603D (CHIP Capacitor, 1.6X0.8mm, 0603 , SMD (SolderMask Defined))
pins: 1, 2

## CMP-0090660-1
designator R?, comment value 4m  (hidden comment: KRL2012E-M-R004-F-T5)
4 mOhms -1% 1W Chip Resistor Wide 0805 (2012 Metric), 0508 Automotive AEC-Q200, Current Sense Metal Foil; Manufacturer: Susumu; Device: CMP-0090660-1; AEC Grade: Grade 0; TempCo: 50ppm/癈; SizeZ_mm: 0.7mm; AEC Qualified: Yes; Tolerance_%: 1%; Origin Footprint: FP-KRL2012E-M-R004-F-T5_2012-IPC_C; OriginFootprint 2: FP-KRL2012E-M-R004-F-T5_2012-IPC_B; OriginFootprint 3: FP-KRL2012E-M-R004-F-T5_2012-IPC_A; UniqueId: fdc86a4b576d9e98; OriginModelName: Res_KRL2012E-M-R004-F-T5_2012; Symbol: CMP-0090660-1; Supplier 1: Digikey; ComponentLink1URL: https://www.susumu.co.jp/common/pdf/n_catalog_partition19_en.pdf?v=20180406; Series: KRL; Supplier Part Number 1: 408-1594-1-ND; ComponentLink1Description: Datasheet; RoHS: TRUE; PartNumber: KRL2012E-M-R004-F-T5; Datasheet Path: datasheets/Res-KRL2012E-M-R004-F-T5.pdf; Digikey Description: RES 0.004 OHM 1W 0805 WIDE; Part Number: KRL2012E-M-R004-F-T5; Supplier 2: Mouser; datasheet: https://www.susumu.co.jp/common/pdf/n_catalog_partition19_en.pdf?v=20180406; Supplier Part Number 2: 754-KRL2012EMR004FT5; helpURL: https://upverter.com/upn/revision/b6c0b371fcd2c6f4/; Mouser Description: Current Sense Resistors 0805(Long Side 0508) 1.0W 0.004 Ohm 1% 50Ppm; Lead Free: Yes; Operating Temperature Range: -55癈 to +155癈; Technology: Metal Foil; Digikey Part Number: 408-1594-1-ND; Res_ohm: 4m; PackageReference: 2012; Mouser Part Number: 754-KRL2012EMR004FT5; Power_W: 1W; DesignItemID: CMP-0090660-1; LibraryName: Altium Vault - TI; FootprintName: FP-KRL2012E-M-R004-F-T5_2012-MFG; AddInBom: yes
footprint R0508 (CHIP Resistor, 1.3X2.0mm, 0508)
pins: 1, 2

## CMP-0092251-1
designator C?, comment ValueDisplayed: 10uF  (hidden comment: GCM32EC71H106KA03L)
Ceramic Capacitor for Automotive 10uF -10% 50VDC X7S 1210 Embossed T/R; Manufacturer: Murata; Device: CMP-0092251-1; AEC Grade: Grade 1; TempCo: 22%; AEC Qualified: Yes; VDC_V: 50V; Cap_F: 10礔; Tolerance_%: 10%; SizeZ_mm: 2.7mm; Value: 10礔; Origin Footprint: FP-GCM32EC71H106KA03L_1210-IPC_C; OriginFootprint 2: FP-GCM32EC71H106KA03L_1210-IPC_B; OriginFootprint 3: FP-GCM32EC71H106KA03L_1210-IPC_A; UniqueId: cc82bf2c2e22e605; OriginModelName: Cap_GCM32EC71H106KA03L_1210; Symbol: CMP-0092251-1; RoHS: TRUE; ComponentLink1URL: https://www.murata.com/en-us/products/productdetail?partno=GCM32EC71H106KA03%23; Temperature Characteristic: X7S; Part Number: GCM32EC71H106KA03L; PackageReference: 1210; datasheet: https://www.murata.com/en-us/products/productdetail?partno=GCM32EC71H106KA03%23; ComponentLink1Description: Datasheet; helpURL: https://upverter.com/upn/revision/edd6109eef88ffd0/; Operating Temperature Range: -55癈 to +125癈; Datasheet Path: datasheets/Cap-GCM32EC71H106KA03L.pdf; Lead Free: Yes; PartNumber: GCM32EC71H106KA03L; DesignItemID: CMP-0092251-1; LibraryName: Altium Vault - TI; FootprintName: FP-GCM32EC71H106KA03L_1210-MFG; AddInBom: yes
footprint C1210 (Chip Capacitor, Body 3.2x2.5mm, IPC High Density)
pins: 1, 2

## CMP-0092440-1
designator C?, comment ValueDisplayed: 18nF  (hidden comment: GCM21B5C1H183JA16L)
Ceramic Capacitor for Automotive 18nF -5% 50VDC C0G 0805 Embossed T/R; Manufacturer: Murata; Device: CMP-0092440-1; TempCo: 30ppm/癈; AEC Qualified: Yes; Tolerance_%: 5%; AEC Grade: Grade 1; VDC_V: 50V; SizeZ_mm: 1.4mm; Origin Footprint: FP-GCM21B5C1H183JA16L_0805-IPC_C; OriginFootprint 2: FP-GCM21B5C1H183JA16L_0805-IPC_B; OriginFootprint 3: FP-GCM21B5C1H183JA16L_0805-IPC_A; UniqueId: 97d7532320e593d5; OriginModelName: Cap_GCM21B5C1H183JA16L_0805; Symbol: CMP-0092440-1; Operating Temperature Range: -55癈 to +125癈; ComponentLink1URL: https://www.murata.com/en-us/products/productdetail?partno=GCM21B5C1H183JA16%23; datasheet: https://www.murata.com/en-us/products/productdetail?partno=GCM21B5C1H183JA16%23; PackageReference: 0805; PartNumber: GCM21B5C1H183JA16L; Part Number: GCM21B5C1H183JA16L; Temperature Characteristic: C0G; ComponentLink1Description: Datasheet; RoHS: TRUE; Cap_F: 18nF; Value: 18nF; Lead Free: Yes; Datasheet Path: datasheets/Cap-GCM21B5C1H183JA16L.pdf; helpURL: https://upverter.com/upn/revision/286cb77b29c01871/; DesignItemID: CMP-0092440-1; LibraryName: Altium Vault - TI; FootprintName: FP-GCM21B5C1H183JA16L_0805-MFG; AddInBom: yes
footprint C0805D (CHIP Capacitor, 2.0X1.3mm, 0805, SMD (SolderMask Defined))
pins: 1, 2

## CMP-0094661-2
designator U?, comment LM5177DCPR
Wide VIN Bidirectional 4 Switch Buck-Boost Controller; Manufacturer: Texas Instruments; Manufacturer Lifecycle Status: ACTIVE; Device: CMP-0094661-2; Output Voltage: 3.3-78V; Max Supply Voltage: 78V; AEC Qualified: No; SizeZ_mm: 1.2mm; Switching Frequency: 100-2000kHz; AEC Category: Q200; Number Of Outputs: 2; Min Supply Voltage: 2.8V; Output Type: AdjustableProgrammable; Max Duty Cycle: 100%; CompType: IC; Standoff Height: 0.05mm; Nominal Supply Current: 25uA; TJmax_C: +125癈; Origin Footprint: DCP0038A-IPC_C; OriginFootprint 2: DCP0038A-IPC_B; OriginFootprint 3: DCP0038A-IPC_A; UniqueId: 1bdc0ab44f99f92d; AddInBom: yes; OriginModelName: IC_LM5177DCPR_HTSSOP38; Symbol: CMP-0094661-2; ComponentLink2Description: Product Folder; PartNumber: LM5177DCPR; Operating Temperature Range: -40癈 to +125癈; Part Number: LM5177DCPR; ComponentLink3URL: http://www.ti.com/product/GPN/datasheet; ComponentLink1URL: http://www.ti.com/lit/ds/symlink/GPN.pdf; RoHS: UNKNOWN; ComponentLink3Description: Online Datasheet; ComponentLink1Description: Datasheet Link; Switching Topology: Buck-Boost; ComponentLink2URL: http://www.ti.com/product/GPN; Datasheet Path: datasheets/IC-LM5177DCPR.pdf; helpURL: https://upverter.com/upn/revision/d4783a621c1931dd/; PackageReference: HTSSOP38; DesignItemID: CMP-0094661-2; LibraryName: Altium Vault - TI; FootprintName: DCP0038A-MFG; Supplier 1: Mouser; Manufacturer Part Number: LM5177DCPR; Stock 1: 741; Pricing 1: 1=8.46, 10=6.55, 50=6.08, 100=5.55, 1000=5.42, 10000=4.6 (USD); Height: 1.2mm; Length: 9.7mm; Lifecycle Status: Production; Number of Pins: 38; Thickness: 1.15mm; Topology: Buck-Boost; Width: 4.4mm; ComponentLink4URL: https://sigma.octopart.com:443/150835829/technical_drawing/Texas-Instruments-LM5177DCPR.pdf?src-supplier=Texas+Instruments; ComponentLink4Description: https://sigma.octopart.com:443/150835829/technical_drawing/Texas-Instruments-LM5177DCPR.pdf?src-supplier=Texas+Instruments; ComponentLink5URL: https://octopart.com:443/opatz8j6/c1?t=2meVI9Ys0v26m6bGgLUs4HyxqDgUi_PdijUQkLRB7X3oIMPJ_2DwIqJBGNM9bLa65FmSJmDfBBHzW_XgTEo_27W85jUwvA41jdc23-HisQNZRYaAw8K-zZISmAQrU3bxfEjix9O-NAgtvU4A5AwwDONWmssYZYy-blMv1qKAk4-AKD6qt0hPy3dOUHQAGBQfd-QqZL0d02my4YO46Ni3ATYEmeA6-_BjLvvyW2wXtOpBI_TaTwFyIkmihkdWQNB7lh0T8UMKem9CuUww2GwlSvoQ313VuhdoUvOroaEBkTowtT-WEqcS3g7wEAlf5_jWm8VZvGHioz5-o2QYiqOAEg4vGEjUpPa72dceAeX_PxWG8WqZKv51mQleYH2pctfMbjZwhw&src-supplier=Texas+Instruments; ComponentLink5Description: https://octopart.com:443/opatz8j6/c1?t=2meVI9Ys0v26m6bGgLUs4HyxqDgUi_PdijUQkLRB7X3oIMPJ_2DwIqJBGNM9bLa65FmSJmDfBBHzW_XgTEo_27W85jUwvA41jdc23-HisQNZRYaAw8K-zZISmAQrU3bxfEjix9O-NAgtvU4A5AwwDONWmssYZYy-blMv1qKAk4-AKD6qt0hPy3dOUHQAGBQfd-QqZL0d02my4YO46Ni3ATYEmeA6-_BjLvvyW2wXtOpBI_TaTwFyIkmihkdWQNB7lh0T8UMKem9CuUww2GwlSvoQ313VuhdoUvOroaEBkTowtT-WEqcS3g7wEAlf5_jWm8VZvGHioz5-o2QYiqOAEg4vGEjUpPa72dceAeX_PxWG8WqZKv51mQleYH2pctfMbjZwhw&src-supplier=Texas+Instruments; ComponentLink6URL: http://sigma.octopart.com:80/reach_statement/Texas-Instruments-company-64.pdf?src-supplier=Compliance+Statements; ComponentLink6Description: http://sigma.octopart.com:80/reach_statement/Texas-Instruments-company-64.pdf?src-supplier=Compliance+Statements; ComponentLink7URL: http://sigma.octopart.com:80/conflict_mineral_statement/Texas-Instruments-company-63.pdf?src-supplier=Compliance+Statements; ComponentLink7Description: http://sigma.octopart.com:80/conflict_mineral_statement/Texas-Instruments-company-63.pdf?src-supplier=Compliance+Statements
footprint SOG50_38T
pins: 1 BIAS, 2 NC, 3 VIN, 4 EN/UVLO, 5 NC, 6 IMONOUT, 7 ~{FLT}, 8 NU, 9 NU, 10 DTRK, 11 SYNC, 12 MODE, 13 CFG, 14 SLOPE, 15 RT, 16 SS/ATRK, 17 AGND, 18 COMP, 19 FB, 20 VOUT, 21 NC, 22 ISNSN, 23 ISNSP, 24 NC, 25 SW2, 26 HB2, 27 HO2, 28 NC, 29 LO2, 30 PGND, 31 VCC, 32 LO1, 33 NC, 34 HO1, 35 HB1, 36 SW1, 37 CSA, 38 CSB, 39 PAD

## CMP-0750041-1
designator C?, comment ValueDisplayed: 100pF  (hidden comment: GCM1885C1H101JA16J)
CAP, CERM, 100 pF, 50 V,+/- 5%, C0G/NP0, AEC-Q200 Grade 1, 0603; Manufacturer: MuRata; Device: CMP-0750041-1; AEC Grade: 1; SizeArea_mm2: 1.28; SizeX_mm: 1.6; Polarized: N; Cap_Case: 0603; TaMax_C: 125癈; Value2: 50V; Value: 100pF; U/M: EA; CompType: Capacitor; AEC Qualified: Y; SizeAreaWB_mm2: 4.68; TaMin_C: -55癈; SizeY_mm: 0.8; AEC Category: Q200; OriginFootprint 2: 0603M; OriginFootprint 3: 0603L; OriginFootprint 4: 0603_HV; UniqueId: 0259cc883dd91c7a; AddInBom: yes; Symbol: CMP-0750041-1; SizeZ_mm: 1; TempCo: C0G/NP0; PackageReference: 0603; Tolerance_%: 5%; VDC_V: 50V; Technology: Ceramic; MountType: SMT; RoHS: Y; ComponentLink1Description: Datasheet link; ComponentLink1URL: https://psearch.en.murata.com/capacitor/product/GCM1885C1H101JA16%23.pdf; Cap_F: 100pF; PartNumber: GCM1885C1H101JA16J; Origin Footprint: 0603; DesignItemID: CMP-0750041-1; LibraryName: Altium Vault - TI; FootprintName: 0603S
footprint C0603S (CHIP Capacitor, 1.6X0.8mm, 0603, soldered)
pins: 1, 2

## CMP-0860983-1
designator C?, comment ValueDisplayed: 0.1uF  (hidden comment: 0402BB104KW500)
CAP, CERM, 0.1 礔, 50 V,+/- 10%, X7R, 0402; Manufacturer: Passive Plus; Device: CMP-0860983-1; Cap_Case: 0402; TaMax_C: 125癈; VDC_V: 50V; U/M: EA; CompType: Capacitor; SizeY_mm: 0.5; TaMin_C: -55癈; SizeAreaWB_mm2: 3; Value: 0.1uF; AEC Qualified: N; SizeX_mm: 1; AEC Category: Q200; SizeZ_mm: 0.6; Cap_F: 100nF; OriginFootprint 2: 0402M; OriginFootprint 3: 0402L; UniqueId: 7c674fedd66d7165; AddInBom: yes; Symbol: CMP-0860983-1; RoHS: Y; PackageReference: 0402; AEC Grade: N/A; Technology: Ceramic; TempCo: X7R; ComponentLink1Description: Datasheet link; PartNumber: 0402BB104KW500; SizeArea_mm2: 0.5; MountType: SMT; Tolerance_%: 10%; ComponentLink1URL: https://www.passiveplus.com/pdf/PPI-0402BB104-KW500.DATASHEET.pdf; Polarized: N; Value2: 50V; Origin Footprint: 0402; DesignItemID: CMP-0860983-1; LibraryName: Altium Vault - TI; FootprintName: 0402S
footprint C0402D (CHIP Capacitor, 1.0X0.5mm, 0402, SMD (SolderMask Defined))
pins: 1, 2

## DIODE_SMD_SCHOTTKY_B560C
designator D?, comment B560C
DIODE, SCHOTTKY, 40V, 3A; MANF: DIODES; MANF_P#: B560C-13-F; DESC: DESCRIPTION; PARAM2: 5A; PARAM: 60V; ASSEMBLY: ASSEMBLY; PRICE: PRICE; VALUE: B560C
footprint D_SMC (SMC, Molded Diode, 7.0x6.0mm)
pins: 1, 2

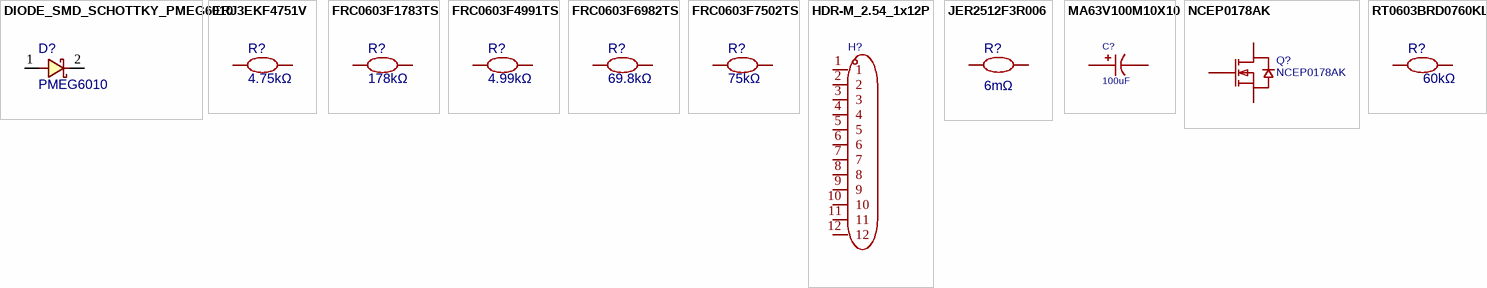
[diagram p1: symbols DIODE_SMD_SCHOTTKY_PMEG6010 to RT0603BRD0760KL]

## DIODE_SMD_SCHOTTKY_PMEG6010
designator D?, comment PMEG6010
DIODE, SCHOTTKY, 60V, 1A; MANF: NEXPERIA; MANF_P#: PMEG6010AESB; DESC: DESCRIPTION; PARAM2: 60Vrrm, 0.6Vf; PARAM: 1A, -65~150oC; ASSEMBLY: ASSEMBLY; PRICE: 0.4$; VALUE: PMEG6010
footprint D_SOD323 (DIODE0805, SOD-323, SC-76, DL-35, 0805 similar size)
pins: 1, 2

## ERJ3EKF4751V
designator R?, comment 4.75kΩ
电阻类型:厚膜电阻;阻值:4.75kΩ;精度:±1%;功率:100mW;工作电压:75V;温度系数:±100ppm/℃;; Manufacturer: PANASONIC(松下); Symbol: ERJ3EKF4751V; Add into BOM: yes; 3D Model: fc143cca1e79419f9cd78b61e9279f08; 3D Model Transform: 31.8897,63.7794,0,90,0,0,0,0,0; Tolerance: ±1%; Power(Watts): 100mW; Voltage-Supply(Max): 75V; ModelName: R0603; Device: ERJ3EKF4751V; Convert to PCB: yes; Value: 4.75kΩ; LCSC Part Name: 厚膜电阻 4.75kΩ ±1% 100mW; Supplier Part: C403242; Manufacturer Part: ERJ3EKF4751V; Supplier Footprint: 0603; JLCPCB Part Class: Extended Part; Datasheet: https://item.szlcsc.com/datasheet/ERJ3EKF4751V/389041.html; Supplier: LCSC; Type: 厚膜电阻; Temperature Coefficient: ±100ppm/℃; Operating Temperature: -55℃~+155℃; FootprintName: R0603
3D model R0603
footprint R0603D (CHIP Resistor 1/10 WATT, 1.6x0.8mm, 0603, SMD (SolderMask Defined))
pins: 1, 2

## FRC0603F1783TS
designator R?, comment 178kΩ
电阻类型:厚膜电阻;阻值:178kΩ;精度:±1%;功率:100mW;工作电压:75V;温度系数:±100ppm/℃;; Manufacturer: FOJAN(富捷); Symbol: FRC0603F1783TS; Add into BOM: yes; 3D Model: fc143cca1e79419f9cd78b61e9279f08; 3D Model Transform: 31.8897,63.7794,0,90,0,0,0,0,0; Tolerance: ±1%; Power(Watts): 100mW; Voltage-Supply(Max): 75V; ModelName: R0603; Device: FRC0603F1783TS; Convert to PCB: yes; Value: 178kΩ; LCSC Part Name: 厚膜电阻 178kΩ ±1% 100mW; Supplier Part: C48533690; Manufacturer Part: FRC0603F1783TS; Supplier Footprint: 0603; JLCPCB Part Class: Extended Part; Datasheet: https://item.szlcsc.com/datasheet/FRC0603F1783TS/50792254.html; Supplier: LCSC; Type: 厚膜电阻; Temperature Coefficient: ±100ppm/℃; Operating Temperature: -55℃~+155℃; FootprintName: R0603
3D model R0603
footprint R0603D (CHIP Resistor 1/10 WATT, 1.6x0.8mm, 0603, SMD (SolderMask Defined))
pins: 1, 2

## FRC0603F4991TS
designator R?, comment 4.99kΩ
电阻类型:厚膜电阻;阻值:4.99kΩ;精度:±1%;功率:100mW;工作电压:75V;温度系数:±100ppm/℃;; Manufacturer: FOJAN(富捷); Symbol: FRC0603F4991TS; Add into BOM: yes; 3D Model: fc143cca1e79419f9cd78b61e9279f08; 3D Model Transform: 31.8897,63.7794,0,90,0,0,0,0,0; Tolerance: ±1%; Power(Watts): 100mW; Voltage-Supply(Max): 75V; ModelName: R0603; Device: FRC0603F4991TS; Convert to PCB: yes; Value: 4.99kΩ; LCSC Part Name: 4.99kΩ ±1% 100mW 厚膜电阻; Supplier Part: C2933228; Manufacturer Part: FRC0603F4991TS; Supplier Footprint: 0603; JLCPCB Part Class: Extended Part; Datasheet: https://item.szlcsc.com/datasheet/FRC0603F4991TS/3279330.html; Supplier: LCSC; Type: 厚膜电阻; Temperature Coefficient: ±100ppm/℃; Operating Temperature: -55℃~+155℃; FootprintName: R0603
3D model R0603
footprint R0603D (CHIP Resistor 1/10 WATT, 1.6x0.8mm, 0603, SMD (SolderMask Defined))
pins: 1, 2